# Altium footprint library EasyLib.PcbLib: 65 footprints (part 1 of 5)
Each footprint in its own frame and in the unit in brackets; x right, y up, seen from the top. Pads: shape width x height; smd on the part's side, far side on the other; paste and mask are expansions set on the pad; w line width, h text height; cw(c..) or ccw(c..) is an arc to the next point about the centre after c.
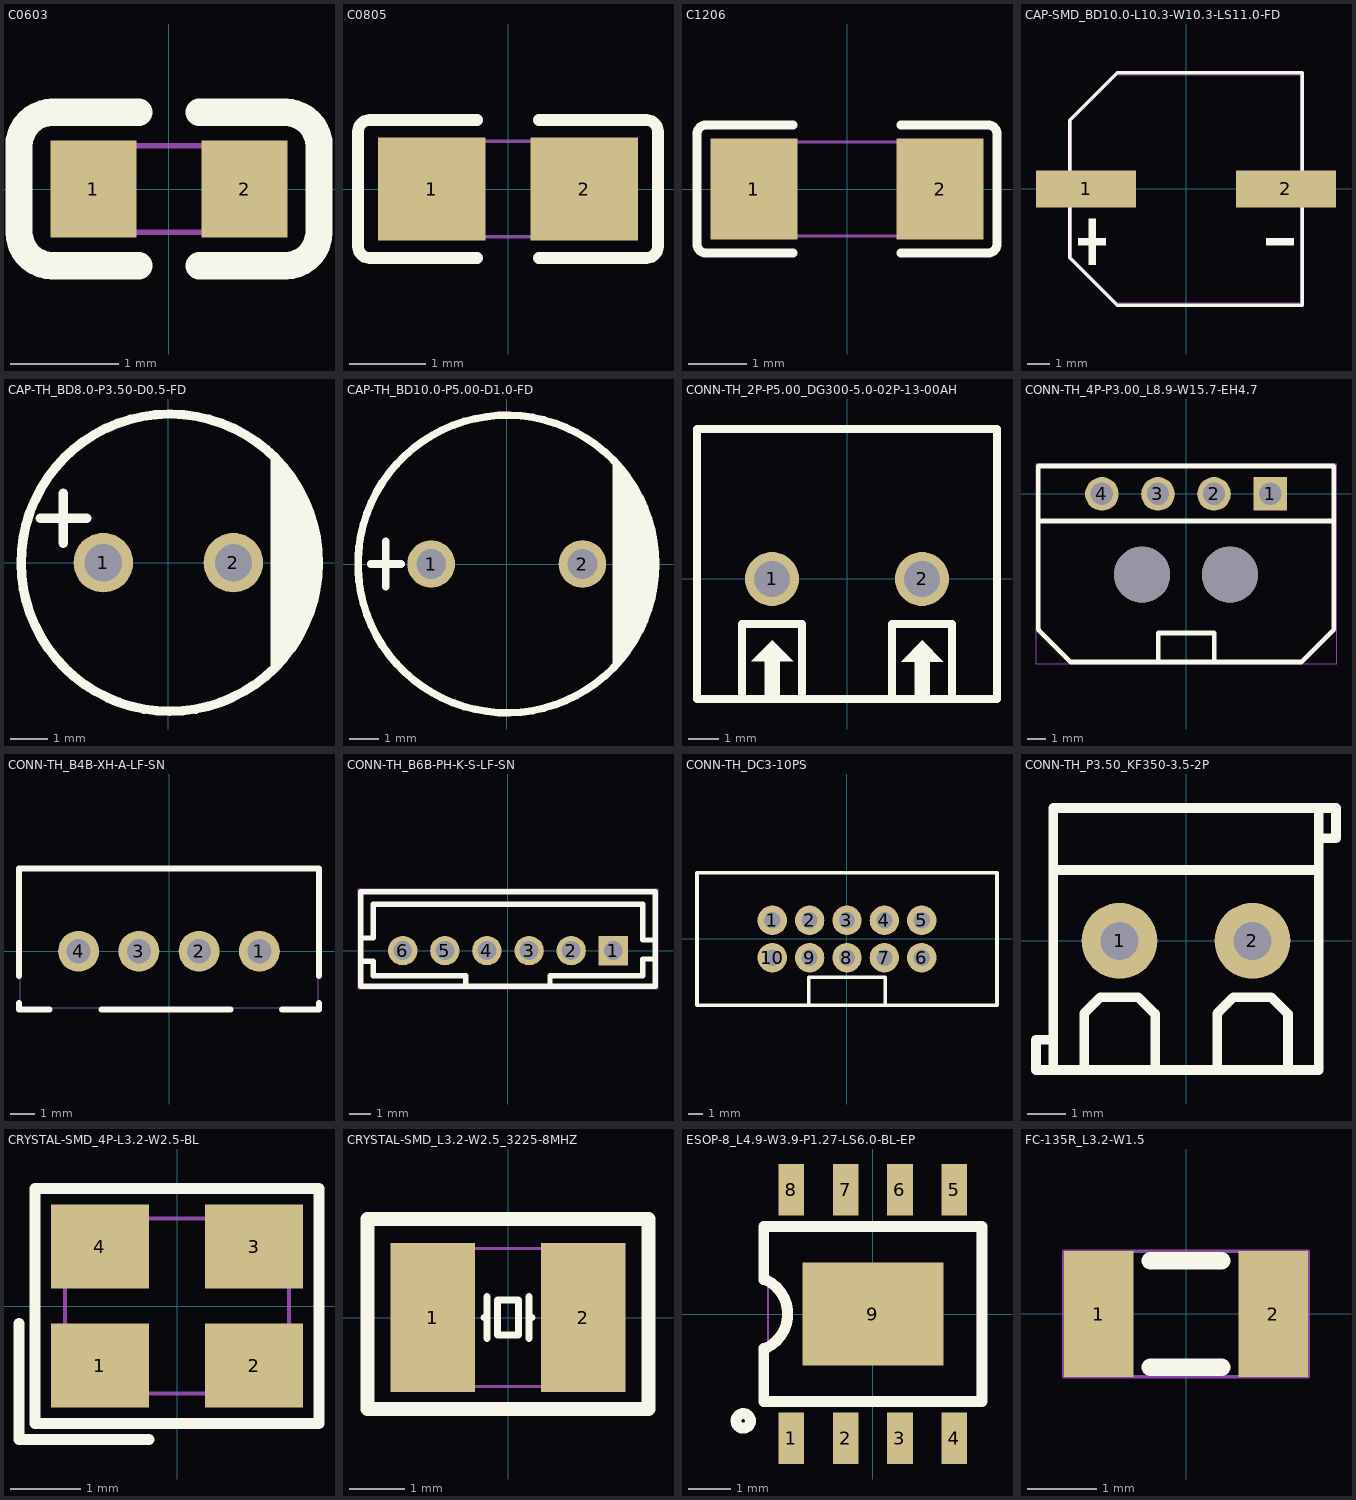
[diagram p0: the footprints below, top view; thin cyan lines are the x and y axes]

## C0603 [mm]
height 0.8
pads (2):
  rect 0.8x0.9 smd: 1(-0.7,0) 2(0.7,0)
Top Overlay:
  lines w0.254: -1.08,-0.71 -0.28,-0.71 ; -1.08,0.71 -0.28,0.71 ; -1.08,-0.71 cw(c-1.08,-0.4) -1.39,-0.4 -1.39,0.4 cw(c-1.08,0.4) -1.08,0.71 ; 0.28,-0.71 1.08,-0.71 ccw(c1.08,-0.4) 1.39,-0.4 1.39,0.4 ccw(c1.08,0.4) 1.08,0.71 0.28,0.71
Mechanical 15:
  lines w0.051: -0.8,-0.4 0.8,-0.4 0.8,0.4 -0.8,0.4 -0.8,-0.4
3D body "C0603_L1.6-W0.8-H0.8.step": height 0.8, standoff 0, extent -0.8,-0.4 0.8,0.4

## C0805 [mm] "10uF (106) ±10% 25V"
height 1.3
pads (2):
  rect 1.41x1.35 smd: 1(-1,0) 2(1,0)
Top Overlay:
  lines w0.152: -0.401,-0.904 -1.811,-0.904 cw(c-1.811,-0.751) -1.964,-0.751 -1.964,0.751 cw(c-1.811,0.751) -1.811,0.904 -0.401,0.904 ; 0.401,-0.904 1.811,-0.904 ccw(c1.811,-0.751) 1.964,-0.751 1.964,0.751 ccw(c1.811,0.751) 1.811,0.904 0.401,0.904
Mechanical 15:
  lines w0.051: -1,-0.625 -1,0.625 1,0.625 1,-0.625 -1,-0.625
3D body "C0805_L2.0-W1.3-H1.3.step": height 1.3, standoff 0, extent -1,-0.65 1,0.65

## C1206 [mm] "4.7uF (475) ±10% 50V"
height 1.3
pads (2):
  rect 1.485x1.728 smd: 1(-1.593,0) 2(1.593,0)
Top Overlay:
  lines w0.152: -0.926,-1.093 -2.411,-1.093 cw(c-2.411,-0.94) -2.564,-0.94 -2.564,0.94 cw(c-2.411,0.94) -2.411,1.093 -0.926,1.093 ; 0.926,-1.093 2.411,-1.093 ccw(c2.411,-0.94) 2.564,-0.94 2.564,0.94 ccw(c2.411,0.94) 2.411,1.093 0.926,1.093
Mechanical 15:
  lines w0.051: -1.6,-0.8 -1.6,0.8 1.6,0.8 1.6,-0.8 -1.6,-0.8
3D body "C1206_L3.2-W1.6-H1.3.step": height 1.3, standoff 0, extent -1.6,-0.8 1.6,0.8

## CAP-SMD_BD10.0-L10.3-W10.3-LS11.0-FD [mm]
height 10.211
pads (2):
  rect 4.5x1.65 smd: 1(-4.5,0) 2(4.5,0)
Top Overlay:
  region: -4.378,-1.339 -4.378,-3.399 -4.069,-3.399 -4.069,-1.339
  region: -4.841,-2.215 -4.841,-2.524 -3.605,-2.524 -3.605,-2.215
  region: 4.841,-2.215 4.841,-2.524 3.605,-2.524 3.605,-2.215
  lines w0.152: -5.226,-0.852 -5.226,-3.09 -3.09,-5.226 5.226,-5.226 5.226,-0.852 ; -5.226,0.852 -5.226,3.09 -3.09,5.226 5.226,5.226 5.226,0.852
Mechanical 15:
  lines w0.051: -5.15,-3.09 -3.09,-5.15 5.15,-5.15 5.15,5.15 -3.09,5.15 -5.15,3.09 -5.15,-3.09
3D body "CAP-SMD_BD10.0-L10.3-W10.3-H10.2.step": height 10.21, standoff 0, extent -5.8,-5.151 5.8,5.15

## CAP-TH_BD8.0-P3.50-D0.5-FD [mm]
height 12.01
pads (2):
  round 1.6 hole 1: 1(-1.75,0) 2(1.75,0)
Top Overlay:
  region: 2.75,-3 3.104,-2.577 3.402,-2.113 3.639,-1.616 3.811,-1.092 3.915,-0.55 3.95,0 3.915,0.55 3.811,1.092 3.639,1.616 3.402,2.113 3.104,2.577 2.75,3
  lines w0.254: -3.445,1.2 -2.2,1.2 ; -2.822,0.527 -2.822,1.873 ; 0.003,4 ccw(c0.038,0.001) 0.074,4
Mechanical 15:
  lines w0.051: -4.001,-0.071 -3.967,0.451 -3.865,0.964 -3.697,1.46 -3.465,1.929 -3.174,2.364 -2.829,2.757 -2.436,3.102 -2.001,3.393 -1.532,3.624 -1.036,3.792 -0.523,3.894 -0.001,3.928 0.521,3.894 1.034,3.792 1.529,3.624 1.999,3.393 2.434,3.102 2.827,2.757 3.172,2.364 3.463,1.929 3.694,1.46 3.862,0.964 3.964,0.451 3.999,-0.071 3.965,-0.593 3.863,-1.106 3.695,-1.602 3.463,-2.071 3.173,-2.506 2.828,-2.899 2.435,-3.244 2,-3.535 1.53,-3.767 1.035,-3.935 0.522,-4.037 0,-4.072 -0.003,-4.072 -0.525,-4.037 -1.038,-3.935 -1.533,-3.767 -2.002,-3.535 -2.437,-3.244 -2.83,-2.899 -3.175,-2.506 -3.466,-2.071 -3.697,-1.602 -3.865,-1.106 -3.967,-0.593 -4.001,-0.071
3D body "CAP-TH_BD8.0-P3.50-D0.5-FD.step": height 12.01, standoff 0, extent -3.853,-4 3.853,4

## CAP-TH_BD10.0-P5.00-D1.0-FD [mm]
height 15.91
pads (2):
  round 1.6 hole 1: 1(-2.54,0) 2(2.54,0)
Top Overlay:
  circle w0.254: c0,0 r5
  region: 3.556,3.556 3.556,-3.556 4.318,-2.54 4.826,-1.016 5.08,0.508 4.826,1.524
  lines w0.254: -4.572,0 -3.556,0 ; -4.064,-0.762 -4.064,0.762
Mechanical 15:
  lines w0.051: -5,0 -4.957,0.653 -4.83,1.294 -4.619,1.913 -4.33,2.5 -3.967,3.044 -3.536,3.536 -3.044,3.967 -2.5,4.33 -1.913,4.619 -1.294,4.83 -0.653,4.957 0,5 0.653,4.957 1.294,4.83 1.913,4.619 2.5,4.33 3.044,3.967 3.536,3.536 3.967,3.044 4.33,2.5 4.619,1.913 4.83,1.294 4.957,0.653 5,0 4.957,-0.653 4.83,-1.294 4.619,-1.913 4.33,-2.5 3.967,-3.044 3.536,-3.536 3.044,-3.967 2.5,-4.33 1.913,-4.619 1.294,-4.83 0.653,-4.957 0,-5 -0.653,-4.957 -1.294,-4.83 -1.913,-4.619 -2.5,-4.33 -3.044,-3.967 -3.536,-3.536 -3.967,-3.044 -4.33,-2.5 -4.619,-1.913 -4.83,-1.294 -4.957,-0.653 -5,0
3D body "CAP-TH_D10.0-H16.0-P5.00.step": height 15.91, standoff 0, extent -4.57,-4.288 4.57,4.288

## CONN-TH_2P-P5.00_DG300-5.0-02P-13-00AH [mm]
height 12.5
pads (2):
  round 1.8 hole 1.2: 1(-2.5,0) 2(2.5,0)
Top Overlay:
  region: -2.5,-4 -2.75,-4 -2.75,-2.75 -3.2,-2.75 -2.5,-2.05 -1.8,-2.75 -2.25,-2.75 -2.25,-4
  region: 2.5,-4 2.25,-4 2.25,-2.75 1.8,-2.75 2.5,-2.05 3.2,-2.75 2.75,-2.75 2.75,-4
  lines w0.254: -3.502,-4 -3.502,-1.5 -1.5,-1.5 -1.5,-4 ; 1.498,-4 1.498,-1.5 3.5,-1.5 3.5,-4 ; -5,-4 -5,5 5,5 5,-4 -5,-4
Mechanical 15:
  lines w0.051: -5,-4 -5,5 5,5 5,-4 -5,-4
3D body "CONN-TH_2P-P5.00_DG300-5.0-02P-13-00AH.step": height 12.5, standoff 0, extent -5.6,-4.005 5,5.005

## CONN-TH_4P-P3.00_L8.9-W15.7-EH4.7 [mm]
height 5.47
pads (6):
  rect 1.801x1.798 hole 1.2: 1(4.5,0)
  round 1.8 hole 1.2: 2(1.5,0) 3(-1.5,0) 4(-4.5,0)
  round 3 hole 3 unplated: ""(-2.35,-4.32) ""(2.35,-4.32)
Top Overlay:
  lines w0.254: -7.9,-7.263 -7.9,1.5 7.89,1.5 ; -7.9,-1.453 7.842,-1.453 ; -7.895,-7.26 -6.155,-9 -6.005,-9 ; -6,-9 6,-9 ; -1.49,-8.932 -1.49,-7.448 1.51,-7.448 1.51,-8.932 ; 6.01,-9 6.16,-9 7.9,-7.26 ; 7.9,-7.263 7.9,1.5
Mechanical 15:
  lines w0.051: -8.027,-9.127 8.027,-9.127 8.027,1.627 -8.027,1.627 -8.027,-9.127
3D body "CONN-TH_4P-P3.00_L8.9-W15.7-EH4.7.step": height 5.47, standoff 0, extent -7.826,-8.9 7.826,1

## CONN-TH_B4B-XH-A-LF-SN [mm]
height 7
pads (4):
  round 1.7 hole 1: 1(3.75,0) 2(1.25,0) 3(-1.25,0) 4(-3.75,0)
Top Overlay:
  lines w0.254: -6.223,-2.159 -6.223,-2.413 -4.953,-2.413 ; -6.223,-1.016 -6.223,3.429 6.223,3.429 6.223,-1.016 ; -2.794,-2.413 2.54,-2.413 ; 4.699,-2.413 6.223,-2.413 6.223,-2.159
Mechanical 15:
  lines w0.051: -6.2,-2.35 -6.2,3.4 6.2,3.4 6.2,-2.35 -6.2,-2.35
3D body "XH2.5-4A.step": height 7, standoff 0, extent -6.25,-2.401 6.25,3.3

## CONN-TH_B6B-PH-K-S-LF-SN [mm]
height 5.9
pads (6):
  rect 1.4x1.4 hole 0.9: 1(5,0)
  round 1.4 hole 0.9: 2(3,0) 3(1,0) 4(-1,0) 5(-3,0) 6(-5,0)
Top Overlay:
  lines w0.254: -7,-0.5 -6.4,-0.5 -6.4,-1.2 -2,-1.2 -2,-1.6 ; -7,0.6 -6.4,0.6 -6.4,2.2 6.4,2.2 6.4,0.5 6.9,0.5 ; 1.999,-1.6 1.999,-1.199 6.401,-1.199 6.401,-0.399 7,-0.399 ; -7,-1.7 7,-1.7 7,2.8 -7,2.8 -7,-1.7
Mechanical 15:
  lines w0.051: -7.127,-1.827 7.127,-1.827 7.127,2.927 -7.127,2.927 -7.127,-1.827
3D body "CONN-TH_B6B-PH-K-S-LF-SN.step": height 5.9, standoff 0, extent -6.951,-1.685 6.95,2.815

## CONN-TH_DC3-10PS [mm]
height 8.6
pads (10):
  round 2 hole 1.1: 1(-5.08,1.27) 2(-2.54,1.27) 3(0,1.27) 4(2.54,1.27) 5(5.08,1.27) 6(5.08,-1.27) 7(2.54,-1.27) 8(0,-1.27) 9(-2.54,-1.27) 10(-5.08,-1.27)
Top Overlay:
  lines w0.254: -10.2,-4.5 10.2,-4.5 10.2,4.5 -10.2,4.5 -10.2,-4.5 ; -2.6,-4.5 2.6,-4.5 2.6,-2.6 -2.6,-2.6 -2.6,-4.5
Mechanical 15:
  lines w0.051: -10.15,-4.5 -10.15,4.5 10.15,4.5 10.15,-4.5 -10.15,-4.5
3D body "CONN-TH_DC3-10PS.step": height 8.6, standoff 0, extent -10.15,-4.3 10.151,4.5

## CONN-TH_P3.50_KF350-3.5-2P [mm]
height 8.8
pads (2):
  round 2 hole 1: 1(-1.75,0) 2(1.75,0)
Top Overlay:
  lines w0.254: -3.5,-2.6 -3.95,-2.6 -3.95,-3.4 -3.5,-3.4 ; -3.5,1.869 3.5,1.869 ; -2.681,-3.4 -2.681,-1.911 -2.25,-1.48 -1.26,-1.48 -0.814,-1.926 -0.814,-3.4 ; 0.819,-3.4 0.819,-1.911 1.25,-1.48 2.24,-1.48 2.686,-1.926 2.686,-3.4 ; 3.5,2.7 3.95,2.7 3.95,3.5 3.5,3.5 ; -3.5,-3.4 3.5,-3.4 3.5,3.5 ; -3.5,-3.4 -3.5,3.5 3.5,3.5
Mechanical 15:
  lines w0.051: -3.5,-3.4 3.5,-3.4 3.5,3.5 -3.5,3.5 -3.5,-3.4
3D body "CONN-TH_P3.50_KF350-3.5-2P.step": height 8.8, standoff 0, extent -4,-3.4 4,3.5

## CRYSTAL-SMD_4P-L3.2-W2.5-BL [mm] "YSX321SL 32MHZ 12PF 10PPM -40~+85"
height 0.701
pads (4):
  rect 1.4x1.2 smd: 1(-1.1,-0.85) 2(1.1,-0.85) 3(1.1,0.85) 4(-1.1,0.85)
Top Overlay:
  lines w0.152: -2.257,-0.25 -2.257,-1.907 -0.4,-1.907 ; -2.029,-1.678 -2.029,1.679 2.029,1.679 2.029,-1.678 -2.029,-1.678
Mechanical 15:
  lines w0.051: -1.6,-1.25 -1.6,1.25 1.6,1.25 1.6,-1.25 -1.6,-1.25
3D body "CRYSTAL-SMD_4P-L3.2-W2.5-BL.step": height 0.7, standoff 0, extent -1.6,-1.25 1.6,1.25

## CRYSTAL-SMD_L3.2-W2.5_3225-8MHZ [mil]
height 39.8
pads (2):
  rect 60x106.3 smd: 1(-53.62,0) 2(53.62,0)
Top Overlay:
  lines w5: -17.02,0.04 -15,0.04 ; -15,-15 -15,15 ; 15,-15 15,15 ; 15,-0.15 17.02,-0.15 ; -7.5,-12.5 7.5,-12.5 7.5,12.5 -7.5,12.5 -7.5,-12.5
  lines w10: -100,-65 100,-65 100,70 -100,70 -100,-65
Mechanical 15:
  lines w2: -62.99,-49.21 -62.99,49.21 62.99,49.21 62.99,-49.21 -62.99,-49.21
3D body "CRYSTAL-SMD_L3.2-W2.5_3225-8MHZ.step": height 39.8, standoff 0, extent -62.99,-49.21 62.99,49.21

## ESOP-8_L4.9-W3.9-P1.27-LS6.0-BL-EP [mm]
height 1.7
pads (9):
  rect 0.6x1.2 smd: 1(-1.905,-2.908) 2(-0.635,-2.908) 3(0.635,-2.908) 4(1.905,-2.908) 5(1.905,2.908) 6(0.635,2.908) 7(-0.635,2.908) 8(-1.905,2.908)
  rect 3.3x2.4 smd: 9(0,0)
Top Overlay:
  circle w0.254: c-3.03,-2.5 r0.17
  lines w0.254: -2.55,-0.8 -2.55,-2.05 2.55,-2.05 2.55,2.05 -2.55,2.05 -2.55,0.8 ; -2.5,-0.8 ccw(c-2.875,0) -2.5,0.8
Mechanical 15:
  lines w0.051: -2.45,-1.95 2.45,-1.95 2.45,1.95 -2.45,1.95 -2.45,-1.95
3D body "ESOP-8_L4.9-W3.9-H1.6-LS6.0-P1.27.step": height 1.7, standoff 0, extent -2.45,-3.053 2.45,3.053

## FC-135R_L3.2-W1.5 [mm] "32.768KHz ±20ppm 12.5pF"
height 0.801
pads (2):
  rect 1x1.8 smd: 1(-1.25,0) 2(1.25,0)
Top Overlay:
  lines w0.254: -0.508,-0.762 0.508,-0.762 ; -0.508,0.762 0.508,0.762
Mechanical 15:
  lines w0.051: -1.75,-0.9 1.75,-0.9 1.75,0.9 -1.75,0.9 -1.75,-0.9
3D body "FC-135R_L3.2-W1.5.step": height 0.8, standoff 0, extent -1.6,-0.75 1.6,0.75